# Altium footprint library Cole_.PcbLib: 167 footprints (part 11 of 11)
Each footprint in its own frame and in the unit in brackets; x right, y up, seen from the top. Pads: shape width x height; smd on the part's side, far side on the other; paste and mask are expansions set on the pad; w line width, h text height; cw(c..) or ccw(c..) is an arc to the next point about the centre after c.
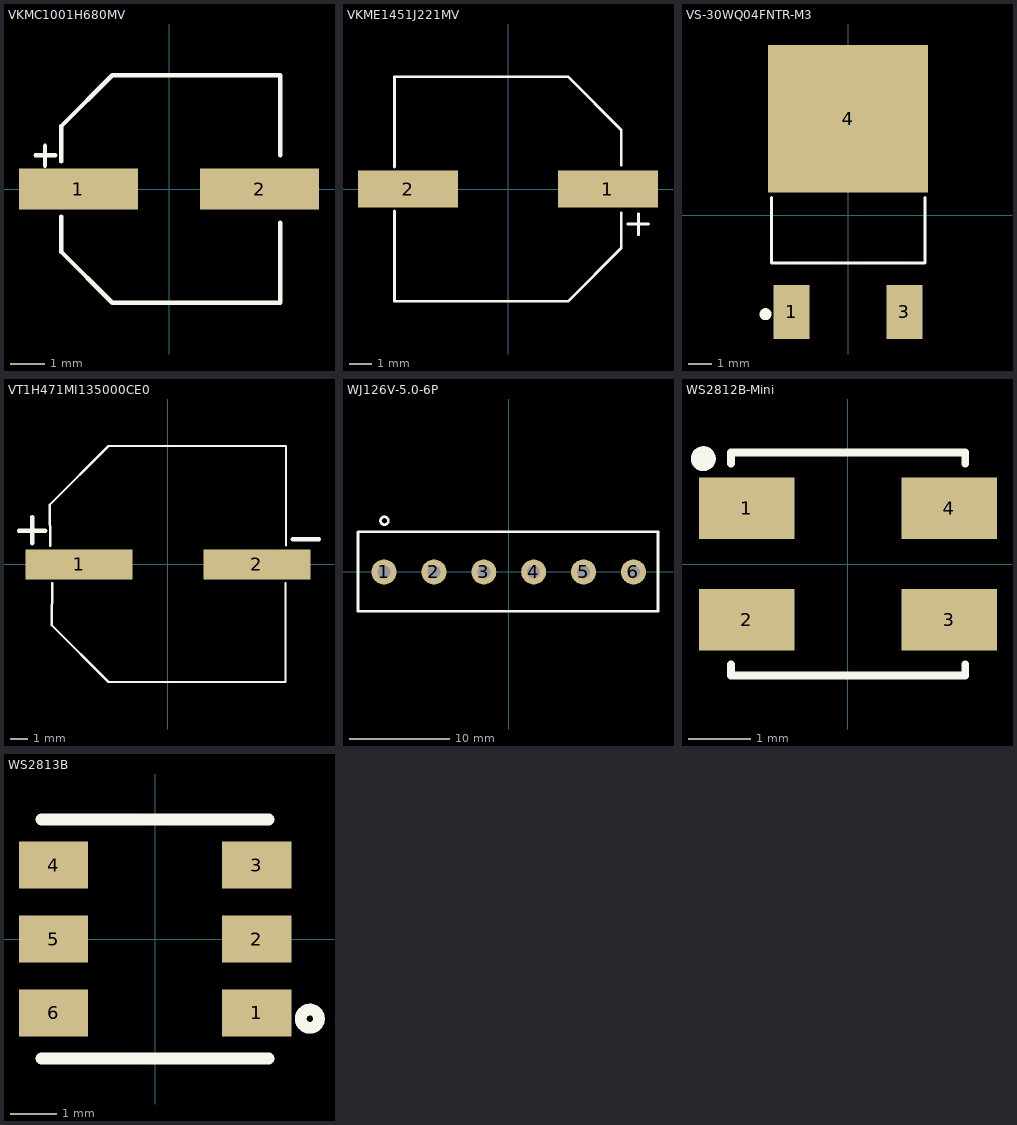
[diagram p10: the footprints below, top view; thin cyan lines are the x and y axes]

## VKMC1001H680MV [mm] "68uF ±20% 50V 6.3mm 10mm 390mA"
pads (2):
  rect 3.5x1.2 smd: 1(-2.67,0) 2(2.67,0)
Top Overlay:
  lines w0.127: -3.934,0.991 -3.35,0.991 ; -3.655,0.686 -3.655,1.27 ; -3.172,-0.813 -3.172,-1.854 -1.673,-3.353 3.28,-3.353 3.28,-0.991 ; -3.172,0.813 -3.172,1.854 -1.673,3.353 3.28,3.353 3.28,0.991
3D body "User Library-CEL63D66S85H.step": height 8.27, standoff -0.03, extent -3.5,-3.3 3.5,3.3

## VKME1451J221MV [mm] "220uF ±20% 63V 10mm 14.5mm 1.2A 100kHz 10000hrs 105? -55?~+105? SMD,10x14.5mm Aluminum Electrolytic Capacitors - SMD RoHS"
pads (2):
  rect 4.5x1.65 smd: 1(4.5,0) 2(-4.5,0)
Top Overlay:
  lines w0.127: -5.112,-0.991 -5.112,-5.055 2.695,-5.055 5.094,-2.655 5.094,-1.067 ; -5.112,0.991 -5.112,5.055 2.695,5.055 5.094,2.655 5.094,1.067 ; 5.385,-1.575 6.325,-1.575 ; 5.87,-2.057 5.87,-1.118
3D body "vkme1451j221mv.stp": height 13.99, standoff -0.01, extent -5.85,-5.15 5.85,5.15

## VS-30WQ04FNTR-M3 [mm] "DIODE SCHOTTKY DPAK"
pads (3):
  rect 1.524x2.28 smd paste+0: 1(-2.38,-4.072) 3(2.38,-4.072)
  rect 6.74x6.23 smd paste+0: 4(0,4.073)
Top Overlay:
  circle w0.254: c-3.48,-4.166 r0.127
  lines w0.127: -3.226,0.762 -3.226,-2.005 3.249,-2.005 3.249,0.762
3D body "User Library-TO252AA.step": height 2.32, standoff 0.01, extent -3.278,-4.571 3.302,5.129

## VT1H471MI135000CE0 [mm] "470uF ±20% 50V 12.5mm 13.5mm 1000hrs 105? -40?~+105? SMD,12.5x13.5mm Aluminum Electrolytic Capacitors - SMD RoHS"
pads (2):
  rect 6.2x1.75 smd: 1(-5.145,0) 2(5.145,0)
Top Overlay:
  lines w0.127: -6.818,1.067 -6.848,3.459 -3.449,6.858 6.833,6.858 6.833,1.092 ; -6.697,-1.092 -6.728,-3.528 -3.449,-6.807 6.797,-6.807 6.797,-1.067
  lines w0.254: -8.625,1.956 -7.101,1.956 ; -7.863,1.219 -7.863,2.743 ; 7.219,1.448 8.743,1.448
3D body "EEVTG1V471UQ.stp": height 14, standoff 0, extent -7.5,-6.85 7.5,6.85

## WJ126V-5.0-6P [mm] "P=5.0mm Screw terminal RoHS"
pads (6):
  round 2.5 hole 1.3: 1(-12.5,0) 2(-7.5,0) 3(-2.5,0) 4(2.5,0) 5(7.5,0) 6(12.5,0)
Top Overlay:
  circle w0.254: c-12.471,5.131 r0.394
  lines w0.254: -15.113,3.962 -15.113,-3.937 14.961,-3.937 14.961,4.013 -15.062,4.013
3D body "Screw Terminal Block 5mm 6-way.step": height 10, standoff -2, extent -15.15,-4 15,4

## WS2812B-Mini [mm] "SMD,3.5x3.5mm Light Emitting Diodes (LED) RoHS"
pads (4):
  rect 1.545x1 smd: 1(-1.638,0.9) 2(-1.638,-0.9) 3(1.638,-0.9) 4(1.638,0.9)
Top Overlay:
  circle w0.2: c-2.337,1.702 r0.102
  lines w0.127: -1.888,-1.626 -1.888,-1.803 1.896,-1.803 1.896,-1.626 ; -1.888,1.626 -1.888,1.803 1.896,1.803 1.896,1.626
3D body "SMD WS2812B Mini.step": height 1.95, standoff 0, extent -1.84,-1.74 1.84,1.74

## WS2813B [mm]
pads (6):
  rect 1.5x1.02 smd: 1(2.2,-1.6) 2(2.2,0) 3(2.2,1.6) 4(-2.2,1.6) 5(-2.2,0) 6(-2.2,-1.6)
Top Overlay:
  circle w0.254: c3.353,-1.727 r0.198
  lines w0.254: -2.464,-2.591 2.464,-2.591 ; -2.464,2.591 2.464,2.591
3D body "led.stp": height 1.5, standoff 0, extent -2.7,-2.5 2.7,2.5